# Altium footprint library 固定柱.PcbLib: 140 footprints (part 1 of 9)
Each footprint in its own frame and in the unit in brackets; x right, y up, seen from the top. Pads: shape width x height; smd on the part's side, far side on the other; paste and mask are expansions set on the pad; w line width, h text height; cw(c..) or ccw(c..) is an arc to the next point about the centre after c.
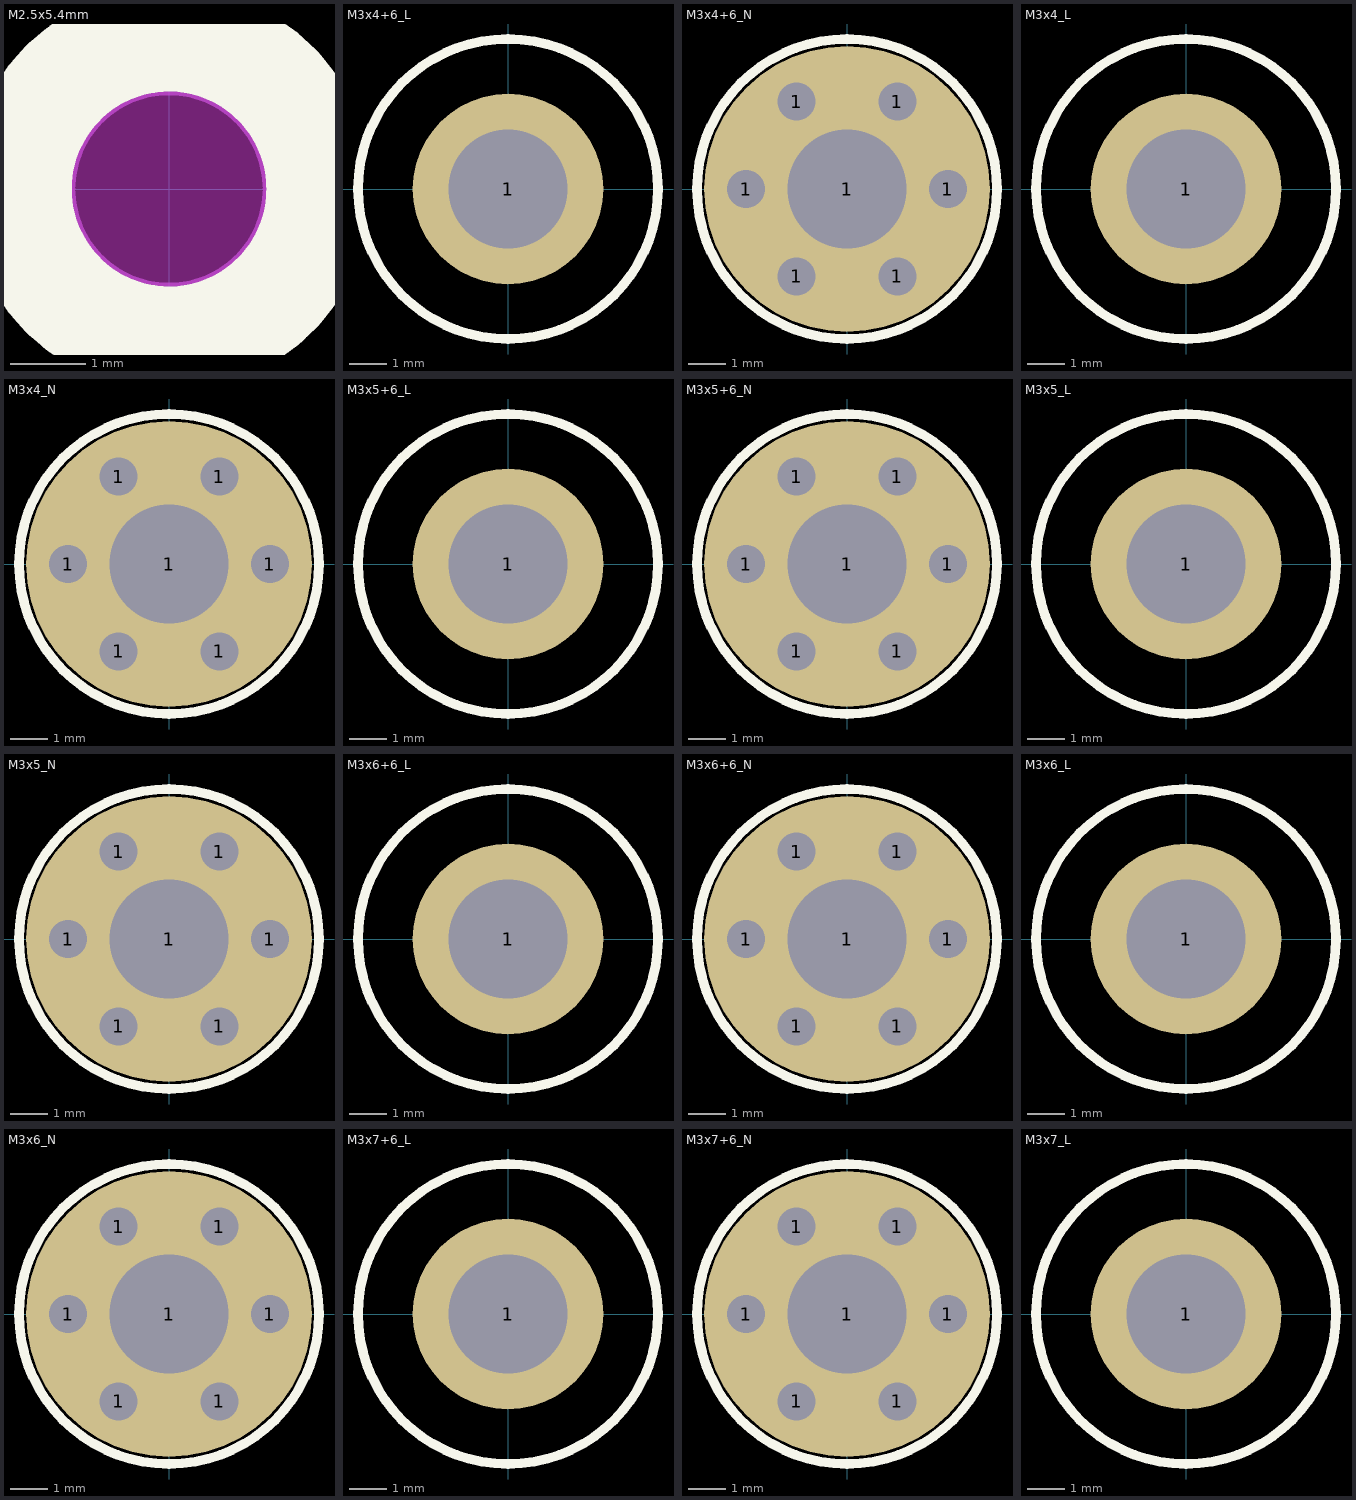
[diagram p0: the footprints below, top view; thin cyan lines are the x and y axes]

## M2.5x5.4mm [mil]
Top Overlay:
  circle w55.12: c0,0 r78.74
Bottom Overlay:
  circle w55.12: c0,0 r78.74
Keep-Out Layer:
  board cut-out: 0,-51.18 -5.04,-51.18 -14.93,-49.21 -24.24,-45.36 -32.63,-39.75 -39.75,-32.63 -45.36,-24.24 -49.21,-14.93 -51.18,-5.04 -51.18,0 -51.18,5.04 -49.21,14.93 -45.36,24.24 -39.75,32.63 -32.63,39.75 -24.24,45.36 -14.93,49.21 -5.04,51.18 0,51.18 5.04,51.18 14.93,49.21 24.24,45.36 32.63,39.75 39.75,32.63 45.36,24.24 49.21,14.93 51.18,5.04 51.18,0 51.18,-5.04 49.21,-14.93 45.36,-24.24 39.75,-32.63 32.63,-39.75 24.24,-45.36 14.93,-49.21 5.04,-51.18
Mechanical 1:
  circle w3.94: c0,0 r51.18

## M3x4+6_L [mil] "M3铜柱，长：4mm，螺纹长：6mm"
pads (1):
  round 200 hole 125: 1(0,0)
Top Overlay:
  circle w10: c0,0 r157.48
3D body "M3x4+6.STEP": height 159.45, standoff -234.25, extent -106.22,-92.52 106.22,92.52

## M3x4+6_N [mil] "M3铜柱，长：4mm，螺纹长：6mm"
pads (7):
  round 40 hole 40: 1(-106,0) 1(-53,-91.8) 1(-53,91.8) 1(53,-91.8) 1(53,91.8) 1(106,0)
  round 300 hole 125: 1(0,0)
Top Overlay:
  circle w10: c0,0 r157.48
3D body "M3x4+6.STEP": height 159.45, standoff -234.25, extent -106.22,-92.52 106.22,92.52

## M3x4_L [mil] "M3铜柱，长：4mm"
pads (1):
  round 200 hole 125: 1(0,0)
Top Overlay:
  circle w10: c0,0 r157.48
3D body "M3x4.STEP": height 159.45, standoff 1.96, extent -106.22,-92.52 106.22,92.52

## M3x4_N [mil] "M3铜柱，长：4mm"
pads (7):
  round 40 hole 40: 1(-106,0) 1(-53,-91.8) 1(-53,91.8) 1(53,-91.8) 1(53,91.8) 1(106,0)
  round 300 hole 125: 1(0,0)
Top Overlay:
  circle w10: c0,0 r157.48
3D body "M3x4.STEP": height 159.45, standoff 1.96, extent -106.22,-92.52 106.22,92.52

## M3x5+6_L [mil] "M3铜柱，长：5mm，螺纹长：6mm"
pads (1):
  round 200 hole 125: 1(0,0)
Top Overlay:
  circle w10: c0,0 r157.48
3D body "M3x5+6.STEP": height 198.82, standoff -234.25, extent -106.22,-92.52 106.22,92.52

## M3x5+6_N [mil] "M3铜柱，长：5mm，螺纹长：6mm"
pads (7):
  round 40 hole 40: 1(-106,0) 1(-53,-91.8) 1(-53,91.8) 1(53,-91.8) 1(53,91.8) 1(106,0)
  round 300 hole 125: 1(0,0)
Top Overlay:
  circle w10: c0,0 r157.48
3D body "M3x5+6.STEP": height 198.82, standoff -234.25, extent -106.22,-92.52 106.22,92.52

## M3x5_L [mil] "M3铜柱，长：5mm"
pads (1):
  round 200 hole 125: 1(0,0)
Top Overlay:
  circle w10: c0,0 r157.48
3D body "M3x5.STEP": height 198.82, standoff 1.96, extent -106.22,-92.52 106.22,92.52

## M3x5_N [mil] "M3铜柱，长：5mm"
pads (7):
  round 40 hole 40: 1(-106,0) 1(-53,-91.8) 1(-53,91.8) 1(53,-91.8) 1(53,91.8) 1(106,0)
  round 300 hole 125: 1(0,0)
Top Overlay:
  circle w10: c0,0 r157.48
3D body "M3x5.STEP": height 198.82, standoff 1.96, extent -106.22,-92.52 106.22,92.52

## M3x6+6_L [mil] "M3铜柱，长：6mm，螺纹长：6mm"
pads (1):
  round 200 hole 125: 1(0,0)
Top Overlay:
  circle w10: c0,0 r157.48
3D body "M3x6+6.STEP": height 238.2, standoff -234.25, extent -106.22,-92.52 106.22,92.52

## M3x6+6_N [mil] "M3铜柱，长：6mm，螺纹长：6mm"
pads (7):
  round 40 hole 40: 1(-106,0) 1(-53,-91.8) 1(-53,91.8) 1(53,-91.8) 1(53,91.8) 1(106,0)
  round 300 hole 125: 1(0,0)
Top Overlay:
  circle w10: c0,0 r157.48
3D body "M3x6+6.STEP": height 238.2, standoff -234.25, extent -106.22,-92.52 106.22,92.52

## M3x6_L [mil] "M3铜柱，长：6mm"
pads (1):
  round 200 hole 125: 1(0,0)
Top Overlay:
  circle w10: c0,0 r157.48
3D body "M3x6.STEP": height 238.19, standoff 1.96, extent -106.22,-92.52 106.22,92.52

## M3x6_N [mil] "M3铜柱，长：6mm"
pads (7):
  round 40 hole 40: 1(-106,0) 1(-53,-91.8) 1(-53,91.8) 1(53,-91.8) 1(53,91.8) 1(106,0)
  round 300 hole 125: 1(0,0)
Top Overlay:
  circle w10: c0,0 r157.48
3D body "M3x6.STEP": height 238.19, standoff 1.96, extent -106.22,-92.52 106.22,92.52

## M3x7+6_L [mil] "M3铜柱，长：7mm，螺纹长：6mm"
pads (1):
  round 200 hole 125: 1(0,0)
Top Overlay:
  circle w10: c0,0 r157.48
3D body "M3x7+6.STEP": height 277.57, standoff -234.25, extent -106.22,-92.52 106.22,92.52

## M3x7+6_N [mil] "M3铜柱，长：7mm，螺纹长：6mm"
pads (7):
  round 40 hole 40: 1(-106,0) 1(-53,-91.8) 1(-53,91.8) 1(53,-91.8) 1(53,91.8) 1(106,0)
  round 300 hole 125: 1(0,0)
Top Overlay:
  circle w10: c0,0 r157.48
3D body "M3x7+6.STEP": height 277.57, standoff -234.25, extent -106.22,-92.52 106.22,92.52

## M3x7_L [mil] "M3铜柱，长：7mm"
pads (1):
  round 200 hole 125: 1(0,0)
Top Overlay:
  circle w10: c0,0 r157.48
3D body "M3x7.STEP": height 277.56, standoff 1.96, extent -106.22,-92.52 106.22,92.52